# Altium schematic symbol library 3032_battery_holder.SchLib: 1 symbol
Pins are listed as number, name and electrical type; pins without a type are passive.

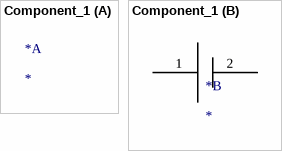
[diagram p0: symbol Component_1]

## Component_1
designator *
footprint 3032 (Footprint not found)
footprint PCBComponent_1
part B pins: 1, 2